# Altium footprint library Footprint_Vlad.PcbLib: 392 footprints (part 12 of 25)
Each footprint in its own frame and in the unit in brackets; x right, y up, seen from the top. Pads: shape width x height; smd on the part's side, far side on the other; paste and mask are expansions set on the pad; w line width, h text height; cw(c..) or ccw(c..) is an arc to the next point about the centre after c.
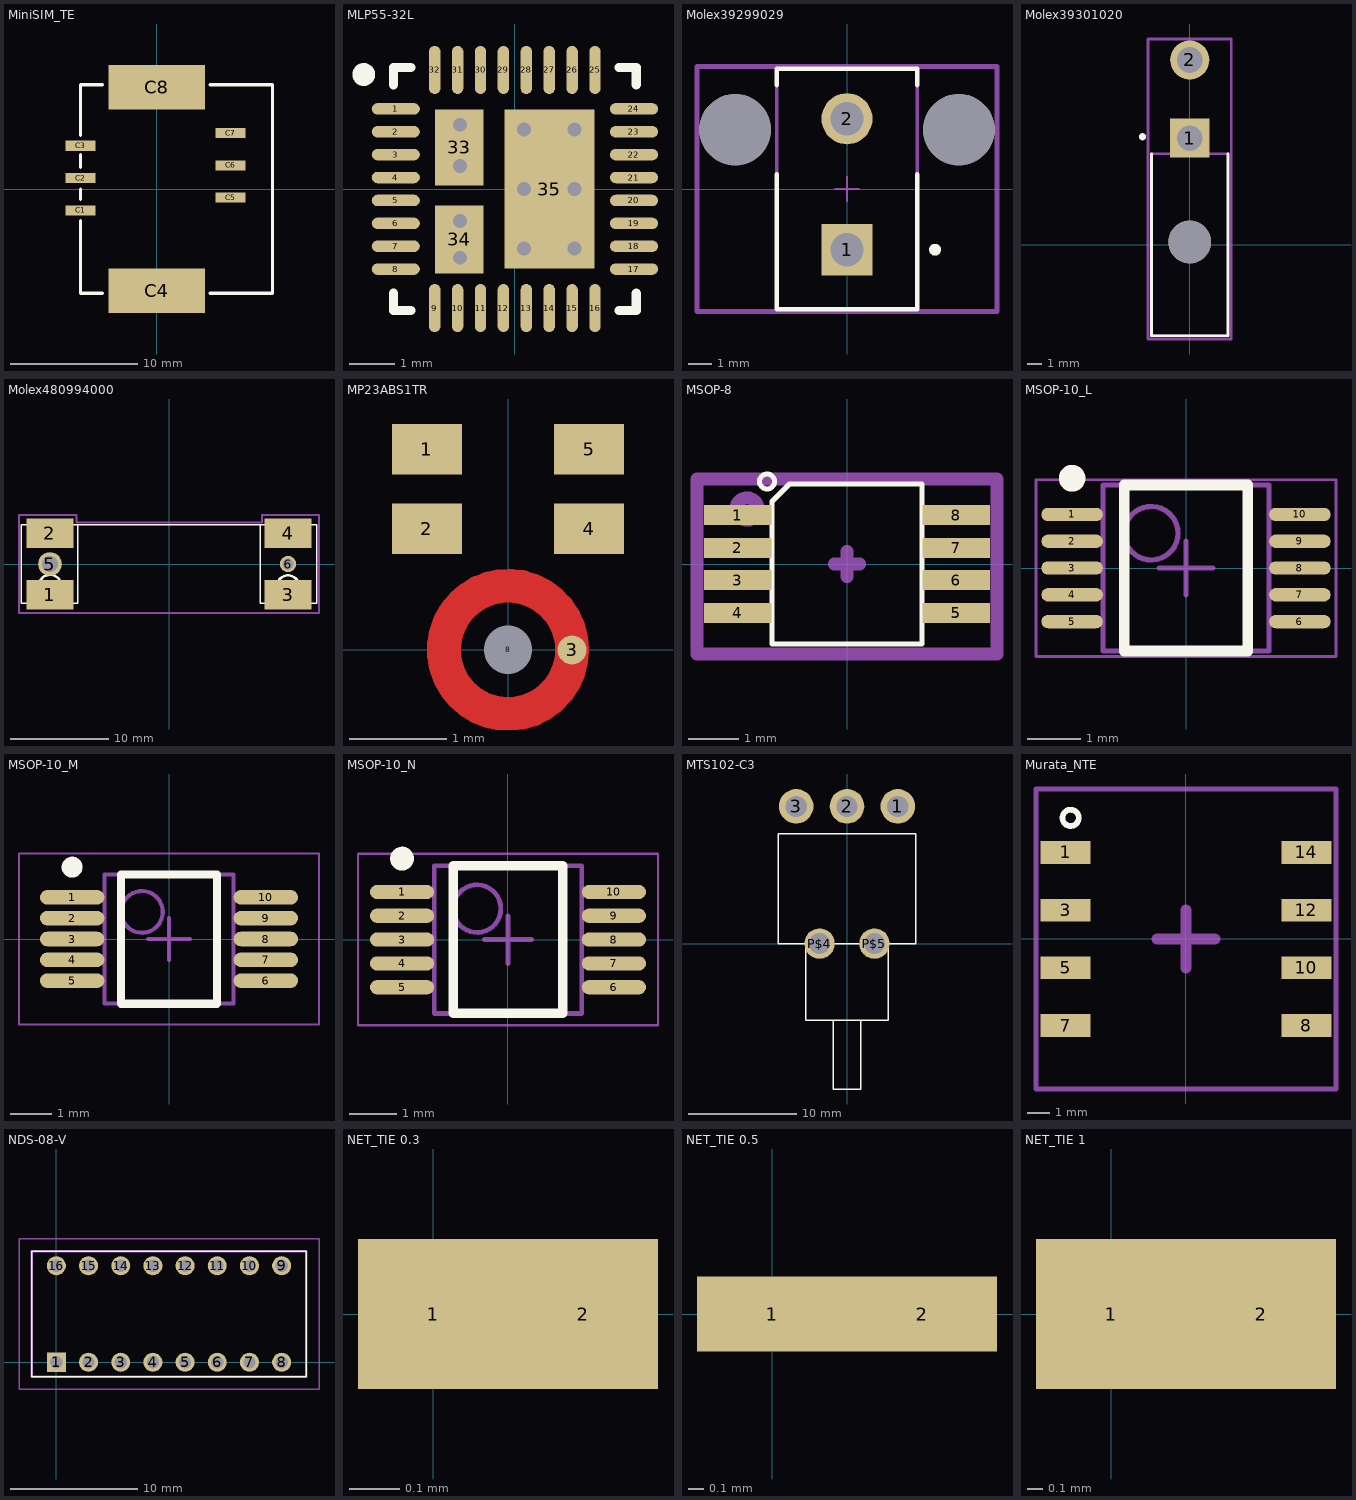
[diagram p11: the footprints below, top view; thin cyan lines are the x and y axes]

## MiniSIM_TE [mm]
pads (8):
  rect 2.38x0.8 smd: C1(-6,-1.68) C2(-6,0.86) C3(-6,3.4) C5(5.8,-0.68) C6(5.8,1.86) C7(5.8,4.4)
  rect 7.6x3.5 smd: С4(0,-8) С8(0,8)
Top Overlay:
  lines w0.254: -6,-2.5 -6,-8.2 -4.3,-8.2 ; -6,-0.8 -6,0 ; -6,1.7 -6,2.7 ; -6,4.2 -6,8.2 -4.3,8.2 ; 4.2,-8.2 9.1,-8.2 9.1,8.2 4.2,8.2
3D body "c-1932768-1-a-3d.stp": height 2.02, standoff 0.01, extent -5.95,-8.15 9.1,8.15

## MLP55-32L [mm] "QFN, 32-Leads, Body 5,00x5,00mm, Pitch 0,50mm, Thermal Pad 3,48x3,48mm, IPC Medium Density"
height 0.85
pads (35):
  oval 1.05x0.25 smd: 1(-2.6,1.75) 2(-2.6,1.25) 3(-2.6,0.75) 4(-2.6,0.25) 5(-2.6,-0.25) 6(-2.6,-0.75) 7(-2.6,-1.25) 8(-2.6,-1.75) 17(2.6,-1.75) 18(2.6,-1.25) 19(2.6,-0.75) 20(2.6,-0.25) 21(2.6,0.25) 22(2.6,0.75) 23(2.6,1.25) 24(2.6,1.75)
  oval 0.25x1.05 smd: 9(-1.75,-2.6) 10(-1.25,-2.6) 11(-0.75,-2.6) 12(-0.25,-2.6) 13(0.25,-2.6) 14(0.75,-2.6) 15(1.25,-2.6) 16(1.75,-2.6) 25(1.75,2.6) 26(1.25,2.6) 27(0.75,2.6) 28(0.25,2.6) 29(-0.25,2.6) 30(-0.75,2.6) 31(-1.25,2.6) 32(-1.75,2.6)
  rect 1.05x1.66 smd: 33(-1.215,0.91)
  rect 1.05x1.48 smd: 34(-1.215,-1.1)
  rect 1.97x3.48 smd: 35(0.755,0)
via 0.2,1.3 diameter 0.7 hole 0.3
via 0.2,0 diameter 0.7 hole 0.3
via 0.2,-1.3 diameter 0.7 hole 0.3
via 1.3,0 diameter 0.7 hole 0.3
via 1.3,1.3 diameter 0.7 hole 0.3
via 1.3,-1.3 diameter 0.7 hole 0.3
via -1.2,1.4 diameter 0.6 hole 0.3
via -1.2,0.5 diameter 0.6 hole 0.3
via -1.2,-0.7 diameter 0.6 hole 0.3
via -1.2,-1.5 diameter 0.6 hole 0.3
Top Overlay:
  circle w0.25: c-3.3,2.5 r0.125
  lines w0.2: -2.65,-2.275 -2.65,-2.65 -2.275,-2.65 ; -2.65,2.275 -2.65,2.65 -2.275,2.65 ; 2.275,-2.65 2.65,-2.65 2.65,-2.275 ; 2.275,2.65 2.65,2.65 2.65,2.275
3D body "User Library-SiC402.STEP": height 0.9, standoff 0, extent -2.502,-2.499 2.498,2.501

## Molex39299029 [mm]
pads (4):
  rect 2.15x2.15 hole 1.4 paste-1000 mask+0: 1(0,-2.55)
  round 2.15 hole 1.4 paste-1000 mask+0: 2(0,2.95)
  round 3 hole 3 unplated paste-1000 mask+0: ""(-4.7,2.49) ""(4.7,2.49)
Top Overlay:
  circle w0.25: c3.7,-2.55 r0.125
  lines w0.2: -2.95,0.615 -2.95,-5.05 2.95,-5.05 2.95,0.615 ; -2.95,4.365 -2.95,5.05 2.95,5.05 2.95,4.365
Top Component Center:
  lines w0.2: -6.3,-5.15 -6.3,5.15 6.3,5.15 6.3,-5.15 -6.3,-5.15
  text ".Designator" at 0,0 h1
Mechanical 12:
  lines w0.15: -2.95,-5.05 -2.95,5.05 2.95,5.05 2.95,-5.05 -2.95,-5.05
Mechanical 15:
  lines w0.1: -0.5,0 0.5,0 ; 0,-0.5 0,0.5
  lines w0.2: -6.3,-5.15 -6.3,5.15 6.3,5.15 6.3,-5.15 -6.3,-5.15
3D body "Conn_Molex_39-29-9029_eec.STEP": height 0.25, standoff 0, extent -6.3,-5.15 6.3,5.15

## Molex39301020 [mm]
pads (3):
  rect 2.75x2.75 hole 1.8 paste-1000 mask+0: 1(0,7.5)
  round 2.75 hole 1.8 paste-1000 mask+0: 2(0,13)
  round 3 hole 3 unplated paste-1000 mask+0: ""(0,0.2)
Top Overlay:
  circle w0.25: c-3.325,7.6 r0.125
  lines w0.2: -2.7,6.4 -2.7,-6.4 2.7,-6.4 2.7,6.4
Top Component Center:
  lines w0.2: -2.925,-6.625 -2.925,14.475 2.925,14.475 2.925,-6.625 -2.925,-6.625
  text ".Designator" at 0,3.925 h1
Mechanical 12:
  lines w0.15: -2.7,-6.4 -2.7,6.4 2.7,6.4 2.7,-6.4 -2.7,-6.4
Mechanical 15:
  lines w0.1: -0.5,0 0.5,0 ; 0,-0.5 0,0.5
  lines w0.2: -2.925,-6.625 -2.925,14.475 2.925,14.475 2.925,-6.625 -2.925,-6.625
3D body "3dmodel.step": height 0.25, standoff 0, extent -2.925,-6.625 2.925,14.475

## Molex480994000 [mm]
pads (6):
  rect 4.8x3 smd: 1(-12.1,-3.15) 2(-12.1,3.15) 3(12.1,-3.15) 4(12.1,3.15)
  round 2.4 hole 1.6: 5(-12.1,0)
  round 1.65 hole 1.1: 6(12.1,0)
Top Overlay:
  circle w0.254: c12.1,-2.25 r1.1
  circle w0.254: c-12.1,-2.25 r1.15
  lines w0.152: -15,-3.975 -15,3.975 ; -15,-3.975 -15,3.975 ; -15,-3.975 -9.27,-3.975 ; -15,-3.975 -9.27,-3.975 ; -15,3.975 -9.27,3.975 ; -15,3.975 -9.27,3.975 ; -9.27,-3.975 -9.27,3.975 ; -9.27,-3.975 -9.27,3.975 ; -9.27,3.975 9.27,3.975 ; -9.27,3.975 9.27,3.975 ; 9.27,-3.975 9.27,3.975 ; 9.27,-3.975 9.27,3.975 ; 9.27,-3.975 15,-3.975 ; 9.27,-3.975 15,-3.975 ; 9.27,3.975 15,3.975 ; 9.27,3.975 15,3.975 ; 15,-3.975 15,3.975 ; 15,-3.975 15,3.975
Mechanical 15:
  lines w0.2: -15.25,-5 -15.25,5 -9.425,5 -9.425,4.225 9.45,4.225 9.45,5 15.25,5 15.25,-5 -15.25,-5
3D body "480994000.stp": height 4.85, standoff -0.7, extent -14.225,-4.229 14.225,5.131

## MP23ABS1TR [mm]
pads (6):
  rect 0.725x0.522 smd: 1(-0.838,2.074) 2(-0.838,1.252) 4(0.838,1.252) 5(0.838,2.074)
  round 0.3 smd: 3(0.663,0)
  round 0.1 hole 0.5 unplated: 8(0,0)
Top Layer:
  circle w0.35: c0,0 r0.663

## MSOP-8 [mm]
pads (8):
  rect 1.35x0.4 smd: 1(-2.188,0.975) 2(-2.188,0.325) 3(-2.188,-0.325) 4(-2.188,-0.975) 6(2.188,-0.325) 7(2.188,0.325) 8(2.188,0.975)
  rect 1.35x0.4 smd mask+0.1: 5(2.188,-0.975)
Top Overlay:
  circle w0.1: c-1.6,1.65 r0.15
  lines w0.1: -1.5,-1.6 1.5,-1.6 1.5,1.6 -1.15,1.6 -1.5,1.25 -1.5,-1.6
Mechanical 15:
  circle w0.254: c-2,1.1 r0.224
  lines w0.254: -0.254,0 0.254,0 ; 0,-0.254 0,0.254 ; -3,-1.8 3,-1.8 3,1.7 -3,1.7 -3,-1.8
  text ".Designator" at -2.8,2 h1.52
3D body "User Library-MSOP-8-2.step": height 1.06, standoff -0.01, extent -2.498,-1.5 2.523,1.5

## MSOP-10_L [mm] "MSOP, 10-Leads, Body 3,00x3,00mm, Pitch 0,50mm, IPC-C High Density"
height 1.1
pads (10):
  oval 1.15x0.25 smd: 1(-2.125,1) 2(-2.125,0.5) 3(-2.125,0) 4(-2.125,-0.5) 5(-2.125,-1) 6(2.125,-1) 7(2.125,-0.5) 8(2.125,0) 9(2.125,0.5) 10(2.125,1)
Top Overlay:
  circle w0.25: c-2.125,1.675 r0.125
  lines w0.2: -1.15,-1.55 1.15,-1.55 1.15,1.55 -1.15,1.55 -1.15,-1.55
Assembly Top:
  circle w0.1: c-0.65,0.65 r0.5
  lines w0.1: -1.55,-1.55 1.55,-1.55 1.55,1.55 -1.55,1.55 -1.55,-1.55
Courtyard Top:
  lines w0.05: -2.8,-1.65 2.8,-1.65 2.8,1.65 -2.8,1.65 -2.8,-1.65
  lines w0.1: -0.5,0 0.5,0 ; 0,-0.5 0,0.5
3D body "MSOP-10_L.step": height 1.1, standoff 0, extent -2.45,-1.55 2.45,1.55

## MSOP-10_M [mm] "MSOP, 10-Leads, Body 3,00x3,00mm, Pitch 0,50mm, IPC-A Low Density"
height 1.1
pads (10):
  oval 1.55x0.35 smd: 1(-2.325,1) 2(-2.325,0.5) 3(-2.325,0) 4(-2.325,-0.5) 5(-2.325,-1) 6(2.325,-1) 7(2.325,-0.5) 8(2.325,0) 9(2.325,0.5) 10(2.325,1)
Top Overlay:
  circle w0.25: c-2.325,1.725 r0.125
  lines w0.2: -1.15,-1.55 1.15,-1.55 1.15,1.55 -1.15,1.55 -1.15,-1.55
Assembly Top:
  circle w0.1: c-0.65,0.65 r0.5
  lines w0.1: -1.55,-1.55 1.55,-1.55 1.55,1.55 -1.55,1.55 -1.55,-1.55
Courtyard Top:
  lines w0.05: -3.6,-2.05 3.6,-2.05 3.6,2.05 -3.6,2.05 -3.6,-2.05
  lines w0.1: -0.5,0 0.5,0 ; 0,-0.5 0,0.5
3D body "MSOP-10_M.step": height 1.1, standoff 0, extent -2.45,-1.55 2.45,1.55

## MSOP-10_N [mm] "MSOP, 10-Leads, Body 3,00x3,00mm, Pitch 0,50mm, IPC-B Medium Density"
height 1.1
pads (10):
  oval 1.35x0.3 smd: 1(-2.225,1) 2(-2.225,0.5) 3(-2.225,0) 4(-2.225,-0.5) 5(-2.225,-1) 6(2.225,-1) 7(2.225,-0.5) 8(2.225,0) 9(2.225,0.5) 10(2.225,1)
Top Overlay:
  circle w0.25: c-2.225,1.7 r0.125
  lines w0.2: -1.15,-1.55 -1.15,1.55 1.15,1.55 1.15,-1.55 -1.15,-1.55
Assembly Top:
  circle w0.1: c-0.65,0.65 r0.5
  lines w0.1: -1.55,-1.55 -1.55,1.55 1.55,1.55 1.55,-1.55 -1.55,-1.55
Courtyard Top:
  lines w0.05: -3.15,-1.8 -3.15,1.8 3.15,1.8 3.15,-1.8 -3.15,-1.8
  lines w0.1: -0.5,0 0.5,0 ; 0,-0.5 0,0.5
3D body "MSOP-10_N.step": height 1.1, standoff 0, extent -2.45,-1.55 2.45,1.55

## MTS102-C3 [mm]
pads (5):
  round 3.2 hole 1.95: 1(4.699,12.7) 2(0,12.7) 3(-4.699,12.7)
  round 2.819 hole 1.95: P$4(-2.54,0) P$5(2.54,0)
Top Overlay:
  lines w0.127: -3.81,0 -3.81,-7.112 -1.27,-7.112 ; -3.81,0 3.81,0 ; -3.81,0 -6.35,0 -6.35,10.16 6.35,10.16 6.35,0 3.81,0 ; -1.27,-7.112 -1.27,-13.462 1.27,-13.462 1.27,-7.112 ; -1.27,-7.112 1.27,-7.112 ; 1.27,-7.112 3.81,-7.112 3.81,0
3D body "100SP1T2B4M6QE--3DModel-STEP-520916.STEP": height 6.83, standoff -3.2, extent -6.35,-13.76 6.35,13.39

## Murata_NTE [mm]
pads (8):
  rect 2.2x1 smd: 1(-5.3,3.81) 3(-5.3,1.27) 5(-5.3,-1.27) 7(-5.3,-3.81) 8(5.3,-3.81) 10(5.3,-1.27) 12(5.3,1.27) 14(5.3,3.81)
Top Overlay:
  circle w0.254: c-5.08,5.334 r0.359
Mechanical 15:
  lines w0.2: -6.604,-6.604 6.604,-6.604 6.604,6.604 -6.604,6.604 -6.604,-6.604
  lines w0.5: -1.27,0 1.27,0 ; 0,-1.27 0,1.27
  text ".Designator" at -3.048,7.366 h1.52
3D body "User Library-NTE0303MC.STEP": height 6.35, standoff -0.25, extent -5.725,-6.35 5.725,6.347

## NDS-08-V [mm] "Switch array"
height 7.05
pads (16):
  rect 1.509x1.509 hole 0.97: 1(0,0)
  round 1.509 hole 0.97: 2(2.54,0) 3(5.08,0) 4(7.62,0) 5(10.16,0) 6(12.7,0) 7(15.24,0) 8(17.78,0) 9(17.78,7.62) 10(15.24,7.62) 11(12.7,7.62) 12(10.16,7.62) 13(7.62,7.62) 14(5.08,7.62) 15(2.54,7.62) 16(0,7.62)
Top Overlay:
  lines w0.1: -1.95,-1.14 19.73,-1.14 19.73,8.76 -1.95,8.76 -1.95,-1.14
Assembly Top:
  lines w0.2: -1.95,-1.14 19.73,-1.14 19.73,8.76 -1.95,8.76 -1.95,-1.14
Courtyard Top:
  lines w0.1: -2.95,-2.14 -2.95,9.76 20.73,9.76 20.73,-2.14 -2.95,-2.14
3D body "nds-08v.stp": height 7.09, standoff -3.21, extent -1.982,-1.129 19.698,8.771

## NET_TIE 0.3 [mm] "Net Tie 0.3mm width"
pads (2):
  rect 0.3x0.3 smd paste-10 mask-10: 1(0,0)
  rect 0.3x0.3 smd paste-60 mask-60: 2(0.3,0)

## NET_TIE 0.5 [mm] "Net Tie 0.5mm width"
pads (2):
  rect 1x0.5 smd paste-10 mask-10: 1(0,0) 2(1,0)

## NET_TIE 1 [mm] "Net Tie 1mm width"
pads (2):
  rect 1x1 smd paste-10 mask-10: 1(0,0)
  rect 1x1 smd paste-60 mask-60: 2(1,0)